# Altium footprint library PCB_ConnectorHDR.PcbLib: 139 footprints (part 6 of 9)
Each footprint in its own frame and in the unit in brackets; x right, y up, seen from the top. Pads: shape width x height; smd on the part's side, far side on the other; paste and mask are expansions set on the pad; w line width, h text height; cw(c..) or ccw(c..) is an arc to the next point about the centre after c.
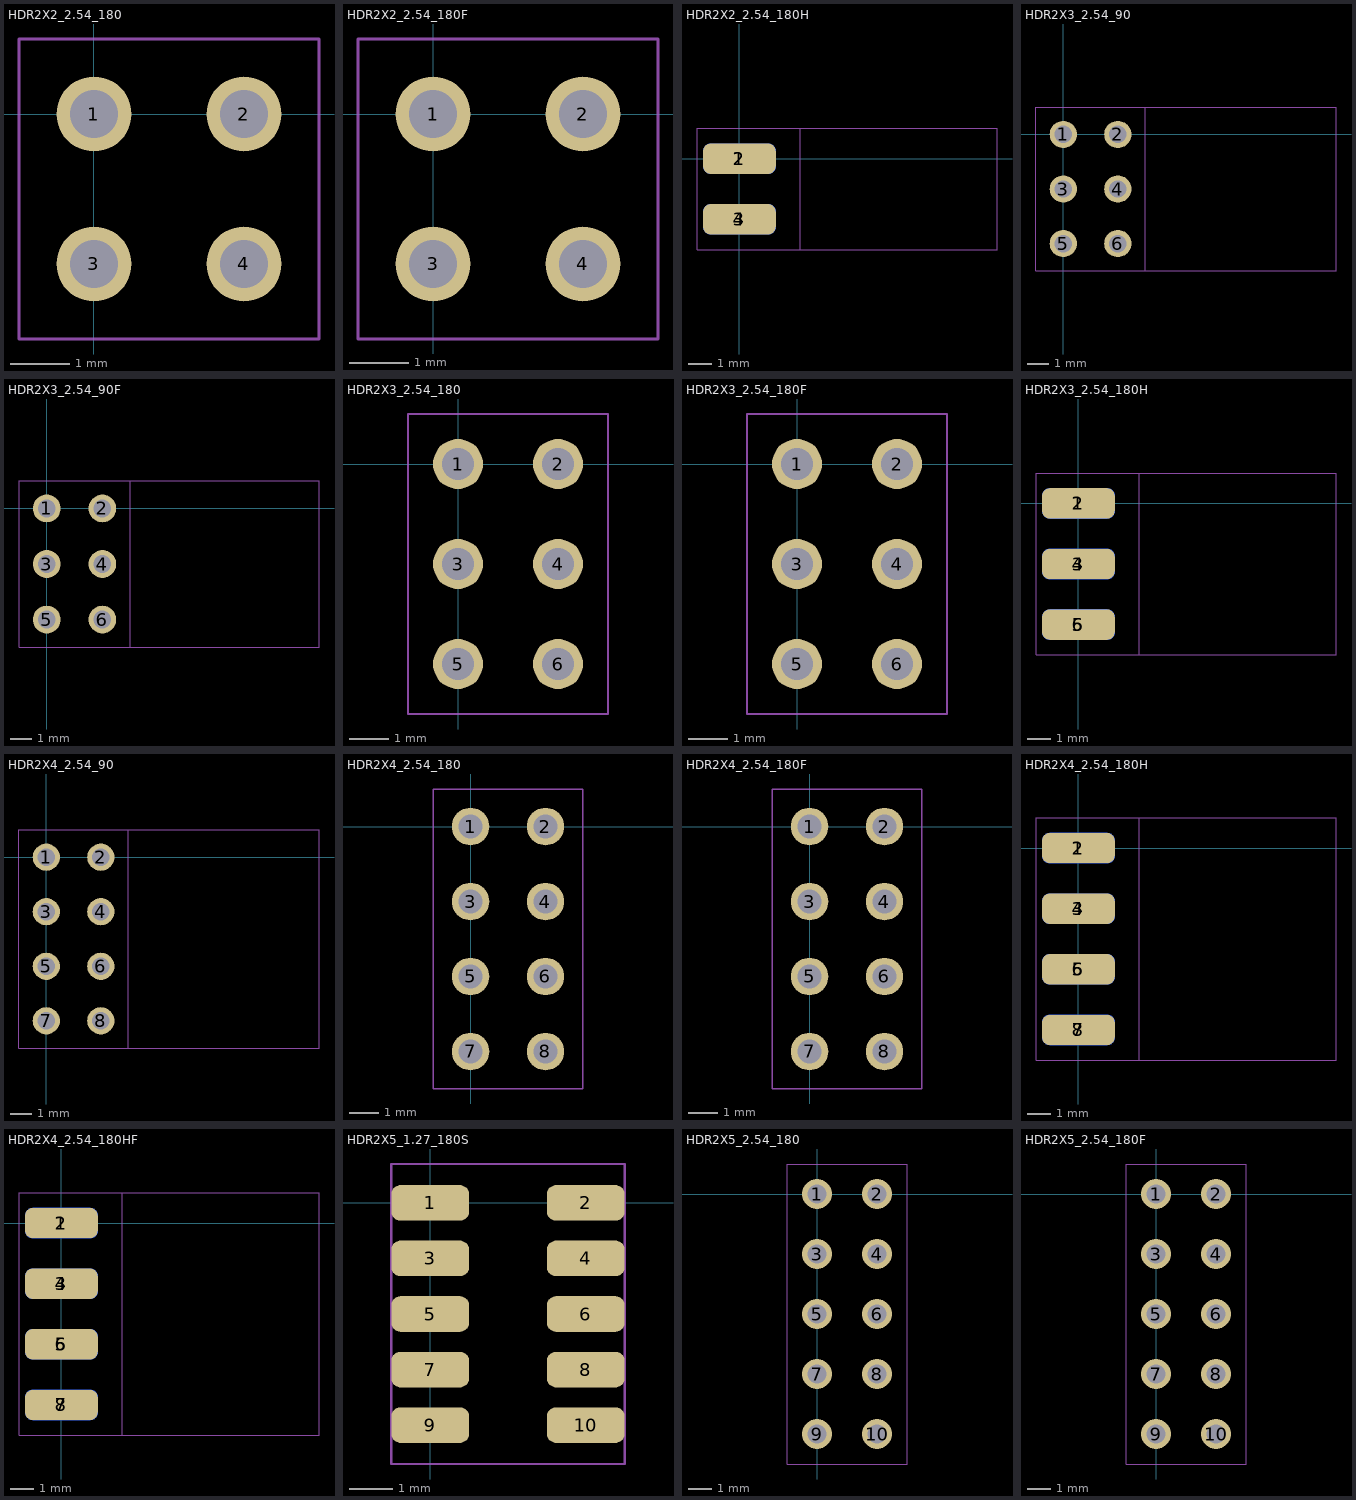
[diagram p5: the footprints below, top view; thin cyan lines are the x and y axes]

## HDR2X2_2.54_180 [mil]
height 169.29
pads (4):
  round 50 hole 32: 1(0,0) 2(100,0) 3(0,-100) 4(100,-100)
Mechanical 13:
  lines w2: -50,-150 -50,50 150,50 150.01,-150 -50,-150
T-Component:
  lines w2: -50,-150 150,-150 150,50 -50,50 -50,-150
  text ".Designator" at 19,-70 h80
3D body "pin_header_awl254-dg-g04d.stp": height 334.65, standoff -118.11, extent -49.99,-150 150.01,50

## HDR2X2_2.54_180F [mil]
height 169.29
pads (4):
  round 50 hole 32: 1(0,0) 2(100,0) 3(0,-100) 4(100,-100)
Mechanical 13:
  lines w2: -50,-150 -50,50 150,50 150,-150 -50,-150
T-Component:
  lines w2: -50,-150 150,-150 150,50 -50,50 -50,-150
  text ".Designator" at 19,-70 h80
3D body "female_header_a-bl254-dg-g04d.stp": height 334.65, standoff -125.98, extent -48.42,-154.93 148.43,54.92

## HDR2X2_2.54_180H [mil]
height 169.29
pads (4):
  rrect50% 120x50 smd: 1(0,0) 3(0,-100)
  rrect50% 120x50 smd far side: 2(0,0) 4(0,-100)
Mechanical 13:
  lines w2: -70,-150 425,-150 425,50 -70,50 -70,-150
T-Component:
  lines w2: -70,-150 100,-150 100,50 -70,50 -70,-150
  text ".Designator" at -31,-70 h80
B-Component:
  lines w2: -70,-150 100,-150 100,50 -70,50 -70,-150
3D body "pin_header_awl254-dg-g04d.stp": height 78, standoff -122, extent -38.11,-149.99 414.65,50.01

## HDR2X3_2.54_90 [mil]
height 169.29
pads (6):
  round 50 hole 32: 1(0,0) 2(100,0) 3(0,-100) 4(100,-100) 5(0,-200) 6(100,-200)
Mechanical 13:
  lines w2: -50,-250 -50,50 500,50 500,-250 -50,-250
T-Component:
  lines w2: -50,-250 150,-250 150,50 -50,50 -50,-250
  text ".Designator" at 19,-120 h80
3D body "pin_header_awl254-da-g06d.stp": height 198.43, standoff -116.54, extent -10,-250 497.09,50

## HDR2X3_2.54_90F [mil]
height 169.29
pads (6):
  round 50 hole 32: 1(0,0) 2(100,0) 3(0,-100) 4(100,-100) 5(0,-200) 6(100,-200)
Mechanical 13:
  lines w2: -50,-250 490,-250 490,50 -50,50 -50,-250
T-Component:
  lines w2: -50,-250 150,-250 150,50 -50,50 -50,-250
  text ".Designator" at 19,-120 h80
3D body "female_header_a-bl254-da-g06d.stp": height 198.43, standoff -124.41, extent -10,-254.92 486.06,54.92

## HDR2X3_2.54_180 [mil]
height 169.29
pads (6):
  round 50 hole 32: 1(0,0) 2(100,0) 3(0,-100) 4(100,-100) 5(0,-200) 6(100,-200)
Mechanical 13:
  lines w2: -50,-250 -50,50 150,50 150,-250 -50,-250
T-Component:
  lines w2: -50,-250 -50,50 150,50 150,-250 -50,-250
  text ".Designator" at 19,-120 h80
3D body "pin_header_awl254-dg-g06d.stp": height 334.65, standoff -118.11, extent -50,-249.99 150,50

## HDR2X3_2.54_180F [mil]
height 169.29
pads (6):
  round 50 hole 32: 1(0,0) 2(100,0) 3(0,-100) 4(100,-100) 5(0,-200) 6(100,-200)
Mechanical 13:
  lines w2: -50,-250 150,-250 150,50 -50,50 -50,-250
T-Component:
  lines w2: -50,-250 150,-250 150,50 -50,50 -50,-250
  text ".Designator" at 19,-120 h80
3D body "female_header_a-bl254-dg-g06d.stp": height 334.65, standoff -125.98, extent -48.42,-254.91 148.43,54.92

## HDR2X3_2.54_180H [mil]
height 169.29
pads (6):
  rrect50% 120x50 smd: 1(0,0) 3(0,-100) 5(0,-200)
  rrect50% 120x50 smd far side: 2(0,0) 4(0,-100) 6(0,-200)
Mechanical 13:
  lines w2: -70,-250 -70,50 425,50 425,-250 -70,-250
T-Component:
  lines w2: -70,-250 -70,50 100,50 100,-250 -70,-250
  text ".Designator" at -31,-120 h80
B-Component:
  lines w2: -70,-250 -70,50 100,50 100,-250 -70,-250
3D body "pin_header_awl254-dg-g06d.stp": height 78, standoff -122, extent -38.11,-249.99 414.65,50.01

## HDR2X4_2.54_90 [mil]
height 169.29
pads (8):
  round 50 hole 32: 1(0,0) 2(100,0) 3(0,-100) 4(100,-100) 5(0,-200) 6(100,-200) 7(0,-300) 8(100,-300)
Mechanical 13:
  lines w2: -50,-350 -50,50 500,50 500,-350 -50,-350
T-Component:
  lines w2: -50,-350 -50,50 150,50 150,-350 -50,-350
  text ".Designator" at 19,-170 h80
3D body "pin_header_awl254-da-g08d.stp": height 198.43, standoff -116.54, extent -12.44,-349.99 494.65,50.01

## HDR2X4_2.54_180 [mil]
height 169.29
pads (8):
  round 50 hole 32: 1(0,0) 2(100,0) 3(0,-100) 4(100,-100) 5(0,-200) 6(100,-200) 7(0,-300) 8(100,-300)
Mechanical 13:
  lines w2: -50,-350 -50,50 150,50 150,-350 -50,-350
T-Component:
  lines w2: -50,-350 -50,50 150,50 150,-350 -50,-350
  text ".Designator" at 19,-170 h80
3D body "pin_header_awl254-dg-g08d.stp": height 334.65, standoff -118.11, extent -50,-349.99 150,50.01

## HDR2X4_2.54_180F [mil]
height 169.29
pads (8):
  round 50 hole 32: 1(0,0) 2(100,0) 3(0,-100) 4(100,-100) 5(0,-200) 6(100,-200) 7(0,-300) 8(100,-300)
Mechanical 13:
  lines w2: -50,-350 150,-350 150,50 -50,50 -50,-350
T-Component:
  lines w2: -50,-350 150,-350 150,50 -50,50 -50,-350
  text ".Designator" at 19,-170 h80
3D body "female_header_a-bl254-dg-g08d.stp": height 334.65, standoff -125.98, extent -48.42,-354.92 148.43,54.93

## HDR2X4_2.54_180H [mil]
height 169.29
pads (8):
  rrect50% 120x50 smd: 1(0,0) 3(0,-100) 5(0,-200) 7(0,-300)
  rrect50% 120x50 smd far side: 2(0,0) 4(0,-100) 6(0,-200) 8(0,-300)
Mechanical 13:
  lines w2: -70,-350 425,-350 425,50 -70,50 -70,-350
T-Component:
  lines w2: -70,-350 100,-350 100,50 -70,50 -70,-350
  text ".Designator" at -31,-170 h80
B-Component:
  lines w2: -70,-350 100,-350 100,50 -70,50 -70,-350
3D body "pin_header_awl254-dg-g08d.stp": height 78, standoff -122, extent -38.11,-350 414.64,50

## HDR2X4_2.54_180HF [mil]
height 169.29
pads (8):
  rrect50% 120x50 smd: 1(0,0) 3(0,-100) 5(0,-200) 7(0,-300)
  rrect50% 120x50 smd far side: 2(0,0) 4(0,-100) 6(0,-200) 8(0,-300)
Mechanical 13:
  lines w2: -70,-350 425,-350 425,50 -70,50 -70,-350
T-Component:
  lines w2: -70,-350 100,-350 100,50 -70,50 -70,-350
  text ".Designator" at -31,-170 h80
B-Component:
  lines w2: -70,-350 100,-350 100,50 -70,50 -70,-350
3D body "female_header_a-bl254-dg-g08d.stp": height 76.43, standoff -120.43, extent -35.98,-354.92 424.65,54.92

## HDR2X5_1.27_180S [mil]
height 169.29
pads (10):
  rrect50% 70x32 smd: 1(0,0) 2(140,0) 3(0,-50) 4(140,-50) 5(0,-100) 6(140,-100) 7(0,-150) 8(140,-150) 9(0,-200) 10(140,-200)
Mechanical 13:
  lines w2: -35,-235 175,-235 175,35 -35,35 -35,-235
T-Component:
  lines w2: -35,-235 175,-235 175,35 -35,35 -35,-235
  text ".Designator" at 44,-120 h80
3D body "pin_header_a-sl127-dg-g10mp1.stp": height 252.13, standoff 0.25, extent -38.36,-224.99 178.34,25.01

## HDR2X5_2.54_180 [mil]
height 169.29
pads (10):
  round 50 hole 32: 1(0,0) 2(100,0) 3(0,-100) 4(100,-100) 5(0,-200) 6(100,-200) 7(0,-300) 8(100,-300) 9(0,-400) 10(100,-400)
Mechanical 13:
  lines w2: -50,-450 -50,50 150,50 150,-450 -50,-450
T-Component:
  lines w2: -50,-450 150,-450 150,50 -50,50 -50,-450
  text ".Designator" at 19,-220 h80
3D body "pin_header_awl254-dg-g10d.stp": height 334.65, standoff -118.11, extent -50,-450 150,50

## HDR2X5_2.54_180F [mil]
height 169.29
pads (10):
  round 50 hole 32: 1(0,0) 2(100,0) 3(0,-100) 4(100,-100) 5(0,-200) 6(100,-200) 7(0,-300) 8(100,-300) 9(0,-400) 10(100,-400)
Mechanical 13:
  lines w2: -50,-450 -50,50 150,50 150,-450 -50,-450
T-Component:
  lines w2: -50,-450 -50,50 150,50 150,-450 -50,-450
  text ".Designator" at 19,-220 h80
3D body "female_header_a-bl254-dg-g10d.stp": height 334.65, standoff -125.98, extent -48.43,-454.92 148.42,54.92